# Altium footprint library RM3100_W.PcbLib: 1 footprints
Each footprint in its own frame and in the unit in brackets; x right, y up, seen from the top. Pads: shape width x height; smd on the part's side, far side on the other; paste and mask are expansions set on the pad; w line width, h text height; cw(c..) or ccw(c..) is an arc to the next point about the centre after c.
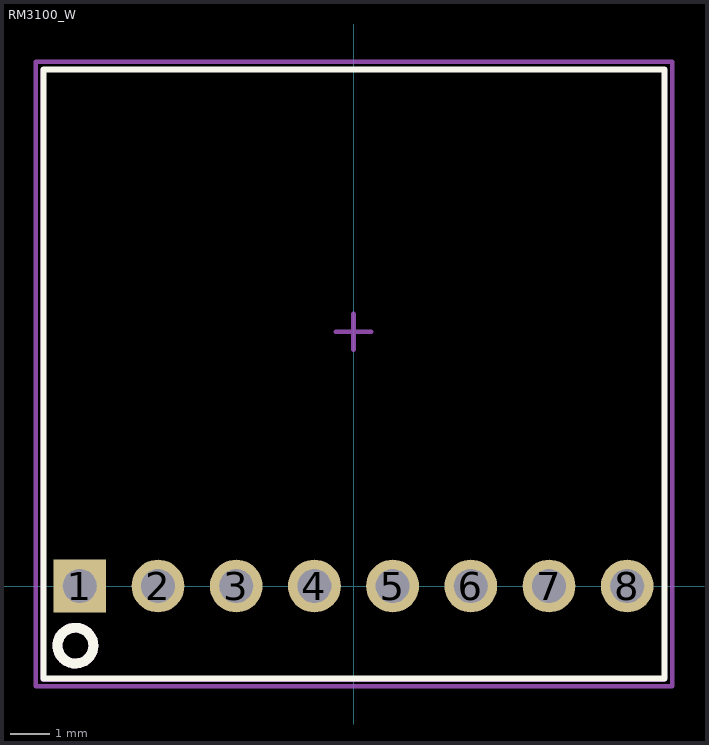
[diagram p0: the footprint, top view; thin cyan lines are the x and y axes]

## RM3100_W [mm] "Magnetometer from Wortem. Courtyard design following IPC 7352 level B."
pads (8):
  rect 1.35x1.35 hole 0.86 paste-2539.97 mask+0.125: 1(-7,0)
  round 1.35 hole 0.86 paste-2539.97 mask+0.125: 2(-5,0) 3(-3,0) 4(-1,0) 5(1,0) 6(3,0) 7(5,0) 8(7,0)
Top Overlay:
  circle w0.254: c-7.112,-1.524 r0.458
  lines w0.15: -7.925,-2.362 7.95,-2.362 7.95,13.208 -7.925,13.208 -7.925,-2.362
Top Assembly:
  circle w0.254: c-7.112,-1.524 r0.458
  lines w0.12: -7.95,-2.389 7.95,-2.389 7.95,13.211 -7.95,13.211 -7.95,-2.389
Top Courtyard:
  lines w0.12: -8.125,-2.562 8.15,-2.562 8.15,13.408 -8.125,13.408 -8.125,-2.562
Top Component Center:
  lines w0.12: -0.457,6.502 0.457,6.502 ; 0,6.045 0,6.96